# Altium schematic symbol library 2020-12-03_22-23-45.SchLib: 2 symbols
Pins are listed as number, name and electrical type; pins without a type are passive.

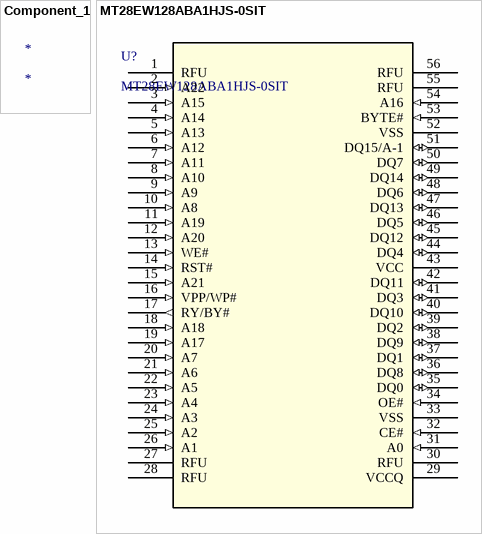
[diagram p0: symbols Component_1 to MT28EW128ABA1HJS-0SIT]

## Component_1
designator *

## MT28EW128ABA1HJS-0SIT
designator U?
No Description Available; Vendor: Micron; Built_By: EMA_Cory; SourceLibrary: Add_to_database_2020-10-30; Datasheet: https://www.mouser.com/datasheet/2/671/MT28EW_QLHP_128_ABA_0SIT-1287006.pdf; Manufacturer_Part_Number: MT28EW128ABA1HJS-0SIT; Copyright: Copyright (C) 2018 Accelerated Designs. All rights reserved; RefDes: RefDes; Type: DEV
footprint TSOP56_JS_MRN
pins: 1 RFU, 2 A22 (in), 3 A15 (in), 4 A14 (in), 5 A13 (in), 6 A12 (in), 7 A11 (in), 8 A10 (in), 9 A9 (in), 10 A8 (in), 11 A19 (in), 12 A20 (in), 13 WE# (in), 14 RST# (in), 15 A21 (in), 16 VPP/WP# (in), 17 RY/BY# (out), 18 A18 (in), 19 A17 (in), 20 A7 (in), 21 A6 (in), 22 A5 (in), 23 A4 (in), 24 A3 (in), 25 A2 (in), 26 A1 (in), 27 RFU, 28 RFU, 29 VCCQ (power), 30 RFU, 31 A0 (in), 32 CE# (in), 33 VSS, 34 OE# (in), 35 DQ0 (io), 36 DQ8 (io), 37 DQ1 (io), 38 DQ9 (io), 39 DQ2 (io), 40 DQ10 (io), 41 DQ3 (io), 42 DQ11 (io), 43 VCC (power), 44 DQ4 (io), 45 DQ12 (io), 46 DQ5 (io), 47 DQ13 (io), 48 DQ6 (io), 49 DQ14 (io), 50 DQ7 (io), 51 DQ15/A-1 (io), 52 VSS, 53 BYTE# (in), 54 A16 (in), 55 RFU, 56 RFU